# Altium schematic symbol library TVS - SMAJ15A-13-F.SchLib: 1 symbol
Pins are listed as number, name and electrical type; pins without a type are passive.

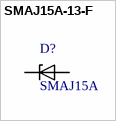
[diagram p0: symbol SMAJ15A-13-F]

## SMAJ15A-13-F
designator D?, comment SMAJ15A
24.4V Clamp 16.4A Ipp Tvs Diode Surface Mount SMA; Manufacturer: Diodes Incorporated; Manufacturer Part Number: SMAJ15A-13-F; Supplier 1: DigiKey; Supplier Part Number 1: SMAJ15A-FDICT-ND; Supplier 2: LCSC; Supplier Part Number 2: C110520; Category: TVS Diodes; Case/Package: DO-214AC, SMA; Supplier Device Package: SMA; Operating Temperature: -55°C ~ 150°C (TJ); Lifecycle Status: Active; ComponentLink1Description: Datasheet; ComponentLink1URL: https://www.diodes.com/assets/Datasheets/SMAJ5.0CA-SMAJ200CA.pdf; ComponentLink2Description: DigiKey; ComponentLink2URL: https://www.digikey.com/en/products/result?keywords=SMAJ15A-13-F
footprint SMA - DIODES (Huella SMA - DIODES)
pins: 1 K, 2 A